# Altium schematic symbol library JST_Terminal.SchLib: 236 symbols (part 3 of 5)
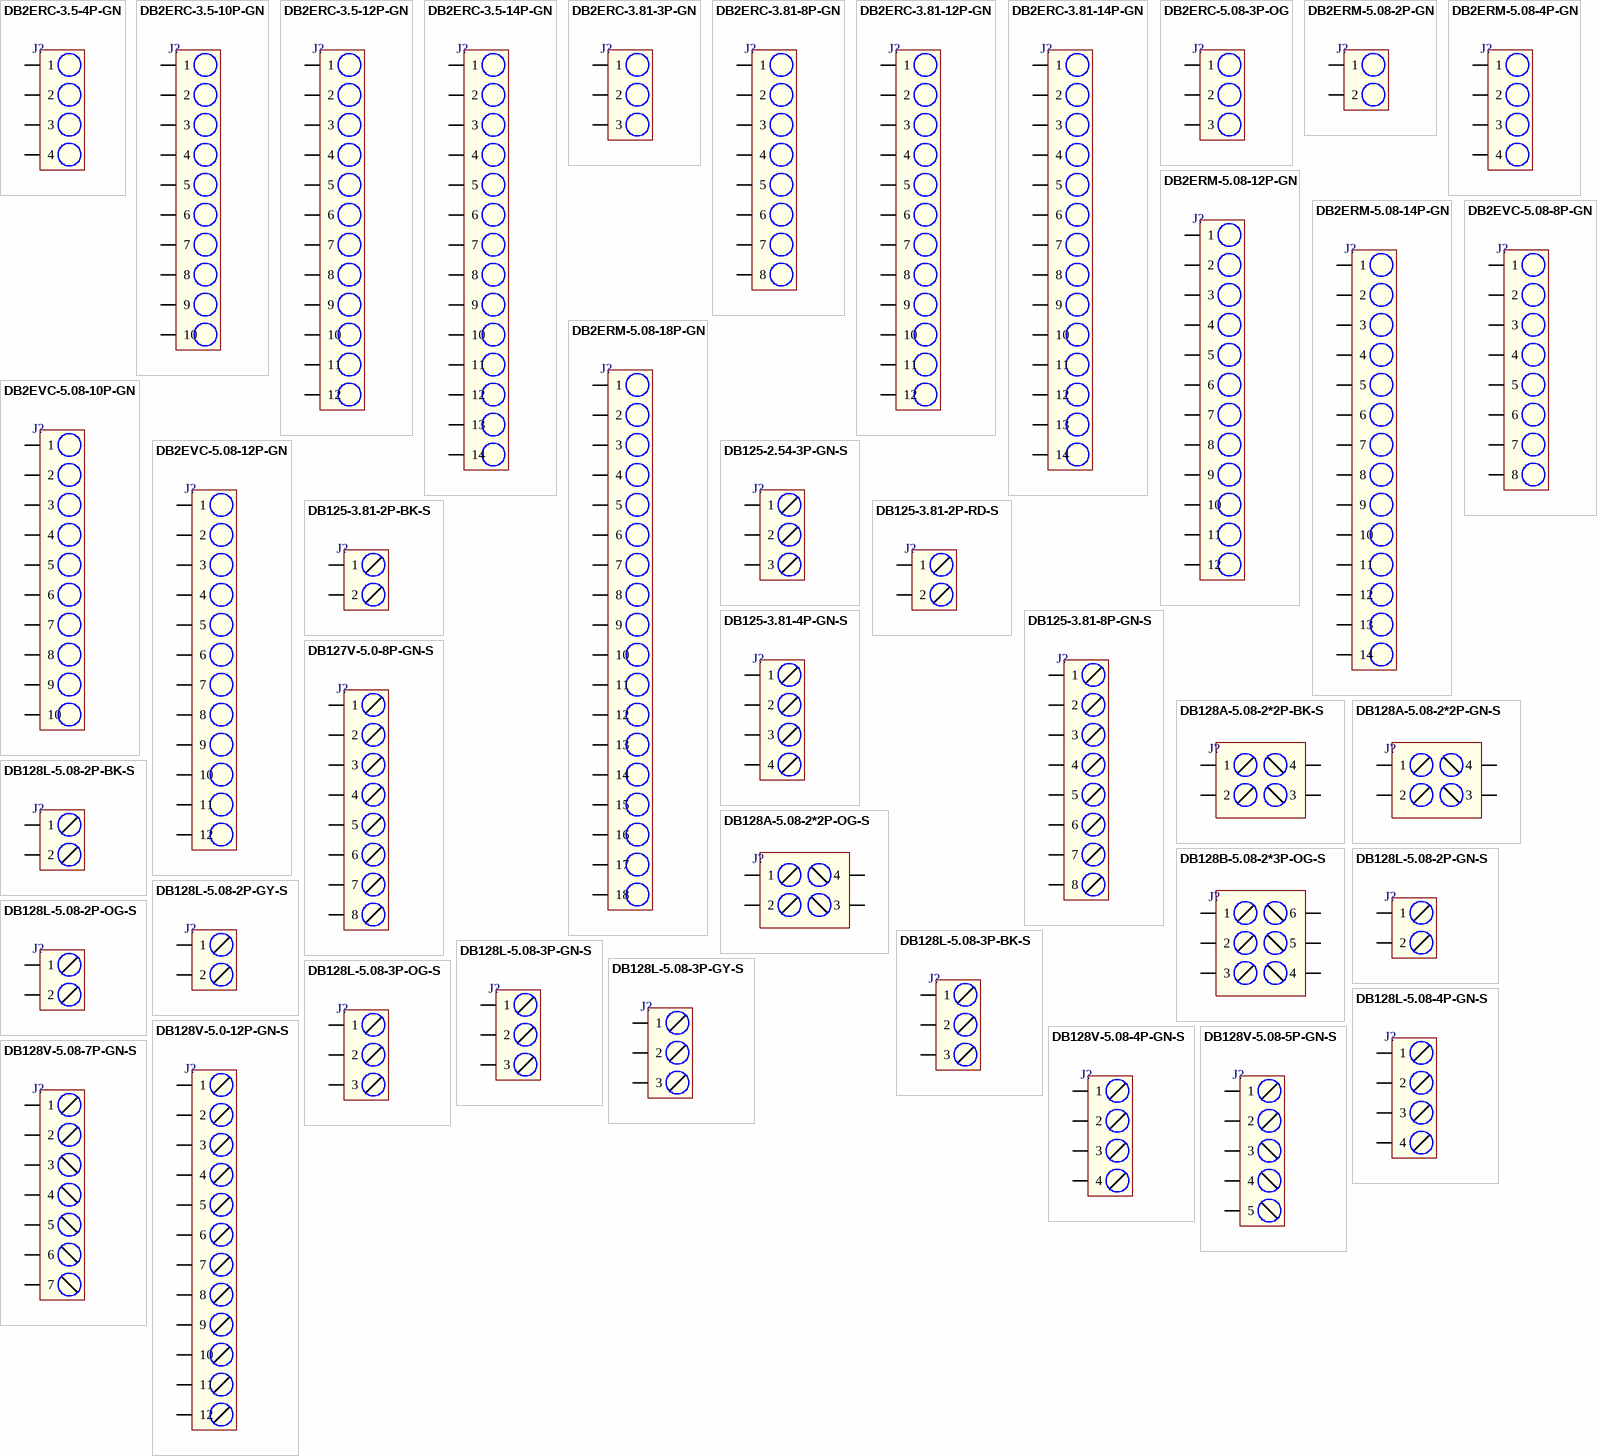
[diagram p7: symbols DB2ERC-3.5-4P-GN to DB128V-5.08-7P-GN-S]

## DB2ERM-5.08-18P-GN
designator J?
320V 20A 18 Bend -40℃~+105℃ 1 5.08mm 1x18P Green Receptacle-Close Screw Fixing Push-Pull,P=5.08mm Pluggable System Terminal Block ROHS; Manufacturer: DORABO; Manufacturer Part Number: DB2ERM-5.08-18P-GN; Package: Push-Pull,P=5.08mm; LCSC Part Number: C430542; Item Type: Terminal Block; ComponentLink1Description: LCSC; ComponentLink1URL: https://www.lcsc.com/product-detail/Pluggable-System-Terminal-Block_DORABO-DB2ERM-5-08-18P-GN_C430542.html?s_z=n_DB2ERM-5.08-18P-GN
footprint DB2ERM-5.08-18P-GN
pins: 1, 2, 3, 4, 5, 6, 7, 8, 9, 10, 11, 12, 13, 14, 15, 16, 17, 18

## DB2EVC-5.08-8P-GN
designator J?
320V 20A 8 Straight pin -40℃~+105℃ 1 5.08mm 1x8P Green Board Edge/Receptacle-Close Plugin,P=5.08mm Pluggable System Terminal Block ROHS; Manufacturer: DIBO; Manufacturer Part Number: DB2EVC-5.08-8P-GN; Package: Plugin,P=5.08mm; LCSC Part Number: C395784; Item Type: Terminal Block; ComponentLink1Description: LCSC; ComponentLink1URL: https://www.lcsc.com/product-detail/Pluggable-System-Terminal-Block_DIBO-DB2EVC-5-08-8P-GN_C395784.html
footprint DB2EVC-5.08-8P-GN
pins: 1, 2, 3, 4, 5, 6, 7, 8

## DB2EVC-5.08-10P-GN
designator J?
320V 20A 10 Straight pin -40℃~+105℃ 1 5.08mm 1x10P Green Board Edge/Receptacle-Close Plugin,P=5.08mm Pluggable System Terminal Block ROHS; Manufacturer: DIBO; Manufacturer Part Number: DB2EVC-5.08-10P-GN; Package: Plugin,P=5.08mm; LCSC Part Number: C395806; Item Type: Terminal Block; ComponentLink1Description: LCSC; ComponentLink1URL: https://www.lcsc.com/product-detail/Pluggable-System-Terminal-Block_DIBO-DB2EVC-5-08-10P-GN_C395806.html
footprint DB2EVC-5.08-10P-GN
pins: 1, 2, 3, 4, 5, 6, 7, 8, 9, 10

## DB2EVC-5.08-12P-GN
designator J?
320V 20A 12 Straight pin -40℃~+105℃ 1 5.08mm 1x12P Green Board Edge/Receptacle-Close Plugin,P=5.08mm Pluggable System Terminal Block ROHS; Manufacturer: DIBO; Manufacturer Part Number: DB2EVC-5.08-12P-GN; Package: Plugin,P=5.08mm; LCSC Part Number: C395823; Item Type: Terminal Block; ComponentLink1Description: LCSC; ComponentLink1URL: https://www.lcsc.com/product-detail/Pluggable-System-Terminal-Block_DIBO-DB2EVC-5-08-12P-GN_C395823.html
footprint DB2EVC-5.08-12P-GN
pins: 1, 2, 3, 4, 5, 6, 7, 8, 9, 10, 11, 12

## DB125-2.54-3P-GN-S
designator J?
1x3P -40℃~+105℃ 8A 130V 18~26 Direct Insert 2.54mm 0.5~1 1 3 Plugin,P=2.54mm Screw Terminal Blocks ROHS; Manufacturer: DORABO; Manufacturer Part Number: DB125-2.54-3P-GN-S; Package: Plugin,P=2.54mm; LCSC Part Number: C918121; Item Type: Terminal; ComponentLink1Description: LCSC; ComponentLink1URL: https://www.lcsc.com/product-detail/Screw-Terminal-Blocks_DORABO-DB125-2-54-3P-GN-S_C918121.html
footprint DB125-2.54-3P-GN-S
pins: 1, 2, 3

## DB125-3.81-2P-BK-S
designator J?
1x2P 10A -40℃~+105℃ 300V Black 16~26 Straight 3.81mm 0.5~1 1 2 Plugin,P=3.81mm Screw terminal ROHS; Manufacturer: DORABO; Manufacturer Part Number: DB125-3.81-2P-BK-S; Item Type: Terminal Block; Package: Plugin,P=3.81mm; LCSC Part Number: C430618; ComponentLink1Description: LCSC; ComponentLink1URL: https://www.lcsc.com/product-detail/Screw-terminal_DORABO-DB125-3-81-2P-BK-S_C430618.html
footprint DB125-3.81-2P-BK-S
pins: 1, 2

## DB125-3.81-2P-RD-S
designator J?
1x2P 10A -40℃~+105℃ 300V Red 16~26 Straight 3.81mm 0.5~1 1 2 Plugin,P=3.81mm Screw terminal ROHS; Manufacturer: DORABO; Manufacturer Part Number: DB125-3.81-2P-RD-S; Item Type: Terminal Block; Package: Plugin,P=3.81mm; LCSC Part Number: C881703; ComponentLink1Description: LCSC; ComponentLink1URL: https://www.lcsc.com/product-detail/Screw-terminal_DORABO-DB125-3-81-2P-RD-S_C881703.html
footprint DB125-3.81-2P-RD-S
pins: 1, 2

## DB125-3.81-4P-GN-S
designator J?
1x4P 10A -40℃~+105℃ 300V Green 16~26 Straight 3.81mm 0.5~1 1 4 Plugin,P=3.81mm Screw terminal ROHS; Manufacturer: DORABO; Manufacturer Part Number: DB125-3.81-4P-GN-S; Item Type: Terminal Block; Package: Plugin,P=3.81mm; LCSC Part Number: C395880; ComponentLink1Description: LCSC; ComponentLink1URL: https://www.lcsc.com/product-detail/Screw-terminal_DORABO-DB125-3-81-4P-GN-S_C395880.html
footprint DB125-3.81-4P-GN-S
pins: 1, 2, 3, 4

## DB125-3.81-8P-GN-S
designator J?
Plugin,P=3.81mm Screw Terminal Blocks ROHS; Manufacturer: DORABO; Manufacturer Part Number: DB125-3.81-8P-GN-S; Package: Plugin,P=3.81mm; LCSC Part Number: C5143698; Item Type: Terminal Block; ComponentLink1Description: LCSC; ComponentLink1URL: https://www.lcsc.com/product-detail/Screw-Terminal-Blocks_DORABO-DB125-3-81-8P-GN-S_C5143698.html
footprint DB125-3.81-8P-GN-S
pins: 1, 2, 3, 4, 5, 6, 7, 8

## DB127V-5.0-8P-GN-S
designator J?
1x8P -40℃~+105℃ 15A 250V Green 14~26 Straight 5mm 1.5 1 8 Plugin,P=5mm Screw Terminal Blocks ROHS; Manufacturer: DIBO; Manufacturer Part Number: DB127V-5.0-8P-GN-S; Supplier: LCSC; LCSC Part Number: C430626; RoHS: No; Item Type: Terminal Block
footprint DB127V-5.0-8P-GN-S
pins: 1, 2, 3, 4, 5, 6, 7, 8

## DB128A-5.08-2*2P-BK-S
designator J?
2x2P 20A -40℃~+105℃ 300V Black 12~28 Straight 5.08mm 1~2.5 2 2 Plugin,P=5.08mm Screw terminal ROHS; Manufacturer: DORABO; Manufacturer Part Number: DB128A-5.08-2*2P-BK-S; Item Type: Terminal Block; Package: Plugin,P=5.08mm; LCSC Part Number: C500035; ComponentLink1Description: LCSC; ComponentLink1URL: https://www.lcsc.com/product-detail/Screw-terminal_DORABO-DB128A-5-08-2-2P-BK-S_C500035.html
footprint DB128A-5.08-2*2P-BK-S
pins: 1, 2, 3, 4

## DB128A-5.08-2*2P-GN-S
designator J?
2x2P 20A -40℃~+105℃ 300V Green 12~28 Straight 5.08mm 1~2.5 2 2 Plugin,P=5.08mm Screw terminal ROHS; Manufacturer: DORABO; Manufacturer Part Number: DB128A-5.08-2*2P-GN-S; Item Type: Terminal Block; Package: Plugin,P=5.08mm; LCSC Part Number: C500029; ComponentLink1Description: LCSC; ComponentLink1URL: https://www.lcsc.com/product-detail/Screw-terminal_DORABO-DB128A-5-08-2-2P-GN-S_C500029.html
footprint DB128A-5.08-2*2P-GN-S
pins: 1, 2, 3, 4

## DB128A-5.08-2*2P-OG-S
designator J?
Plugin,P=5.08mm Screw terminal ROHS; Manufacturer: DORABO; Manufacturer Part Number: DB128A-5.08-2*2P-OG-S; Item Type: Terminal Block; Package: Plugin,P=5.08mm; LCSC Part Number: C5182976; ComponentLink1Description: LCSC; ComponentLink1URL: https://www.lcsc.com/product-detail/Screw-terminal_DORABO-DB128A-5-08-2-2P-OG-S_C5182976.html
footprint DB128A-5.08-2*2P-OG-S
pins: 1, 2, 3, 4

## DB128B-5.08-2*3P-OG-S
designator J?
2x3P 20A -40℃~+105℃ 300V Orange 12~28 Straight 5.08mm 1~2.5 2 3 Plugin,P=5.08mm Screw terminal ROHS; Manufacturer: DORABO; Manufacturer Part Number: DB128B-5.08-2*3P-OG-S; Item Type: Terminal Block; Package: Plugin,P=5.08mm; LCSC Part Number: C500034; ComponentLink1Description: LCSC; ComponentLink1URL: https://www.lcsc.com/product-detail/Screw-terminal_DORABO-DB128B-5-08-2-3P-OG-S_C500034.html
footprint DB128B-5.08-2*3P-OG-S
pins: 1, 2, 3, 4, 5, 6

## DB128L-5.08-2P-BK-S
designator J?
1x2P 18A -40℃~+105℃ 250V Black 12~30 Straight pin 5.08mm 2.5 1 2 Plugin,P=5.08mm Screw terminal ROHS; Manufacturer: DIBO; Manufacturer Part Number: DB128L-5.08-2P-BK-S; Item Type: Terminal Block; Package: Plugin,P=5.08mm; LCSC Part Number: C430601; ComponentLink1Description: LCSC; ComponentLink1URL: https://www.lcsc.com/product-detail/Screw-terminal_span-style-background-color-ff0-DIBO-span-DB128L-5-08-2P-BK-S_C430601.html
footprint DB128L-5.08-2P-BK-S
pins: 1, 2

## DB128L-5.08-2P-GN-S
designator J?
1x2P 18A -40℃~+105℃ 250V Green 12~30 Straight 5.08mm 2.5 1 2 Plugin,P=5.08mm Screw terminal ROHS; Manufacturer: DORABO; Manufacturer Part Number: DB128L-5.08-2P-GN-S; Item Type: Terminal Block; Package: Plugin,P=5.08mm; LCSC Part Number: C395868; ComponentLink1Description: LCSC; ComponentLink1URL: https://www.lcsc.com/product-detail/Screw-terminal_DORABO-DB128L-5-08-2P-GN-S_C395868.html
footprint DB128L-5.08-2P-GN-S
pins: 1, 2

## DB128L-5.08-2P-GY-S
designator J?
1x2P 20A -40℃~+105℃ 300V Gray 12~30 Straight 5.08mm 1~2.5 1 2 Plugin,P=5.08mm Screw terminal ROHS; Manufacturer: DORABO; Manufacturer Part Number: DB128L-5.08-2P-GY-S; Item Type: Terminal Block; Package: Plugin,P=5.08mm; LCSC Part Number: C500021; ComponentLink1Description: LCSC; ComponentLink1URL: https://www.lcsc.com/product-detail/Screw-terminal_DORABO-DB128L-5-08-2P-GY-S_C500021.html
footprint DB128L-5.08-2P-GY-S
pins: 1, 2

## DB128L-5.08-2P-OG-S
designator J?
1x2P 18A -40℃~+105℃ 250V Orange 12~30 Straight 5.08mm 2.5 1 2 Plugin,P=5.08mm Screw terminal ROHS; Manufacturer: DORABO; Manufacturer Part Number: DB128L-5.08-2P-OG-S; Item Type: Terminal Block; Package: Plugin,P=5.08mm; LCSC Part Number: C430603; ComponentLink1Description: LCSC; ComponentLink1URL: https://www.lcsc.com/product-detail/Screw-terminal_DORABO-DB128L-5-08-2P-OG-S_C430603.html
footprint DB128L-5.08-2P-OG-S
pins: 1, 2

## DB128L-5.08-3P-BK-S
designator J?
1x3P 18A -40℃~+105℃ 250V Black 12~30 Straight pin 5.08mm 2.5 1 3 Plugin,P=5.08mm Screw terminal ROHS; Manufacturer: DIBO; Manufacturer Part Number: DB128L-5.08-3P-BK-S; Item Type: Terminal Block; Package: Plugin,P=5.08mm; LCSC Part Number: C430602; ComponentLink1Description: LCSC; ComponentLink1URL: https://www.lcsc.com/product-detail/Screw-terminal_DIBO-DB128L-5-08-3P-BK-S_C430602.html
footprint DB128L-5.08-3P-BK-S
pins: 1, 2, 3

## DB128L-5.08-3P-GN-S
designator J?
1x3P 18A -40℃~+105℃ 250V Green 12~30 Direct Insert 5.08mm 2.5 1 3 Plugin,P=5.08mm Screw Terminal Blocks ROHS; Manufacturer: DORABO; Manufacturer Part Number: DB128L-5.08-3P-GN-S; Package: Plugin,P=5.08mm; LCSC Part Number: C395869; Item Type: Terminal Block; ComponentLink1Description: LCSC; ComponentLink1URL: https://www.lcsc.com/product-detail/Screw-Terminal-Blocks_DORABO-DB128L-5-08-3P-GN-S_C395869.html
footprint DB128L-5.08-3P-GN-S
pins: 1, 2, 3

## DB128L-5.08-3P-GY-S
designator J?
1x3P 20A -40℃~+105℃ 300V Gray 12~30 Direct Insert 5.08mm 1~2.5 1 3 Plugin,P=5.08mm Screw Terminal Blocks ROHS; Manufacturer: DORABO; Manufacturer Part Number: DB128L-5.08-3P-GY-S; Package: Plugin,P=5.08mm; LCSC Part Number: C500022; Item Type: Terminal Block; ComponentLink1Description: LCSC; ComponentLink1URL: https://www.lcsc.com/product-detail/Screw-Terminal-Blocks_DORABO-DB128L-5-08-3P-GY-S_C500022.html
footprint DB128L-5.08-3P-GY-S
pins: 1, 2, 3

## DB128L-5.08-3P-OG-S
designator J?
1x3P 18A -40℃~+105℃ 250V Orange 12~30 Direct Insert 5.08mm 2.5 1 3 Plugin,P=5.08mm Screw Terminal Blocks ROHS; Manufacturer: DORABO; Manufacturer Part Number: DB128L-5.08-3P-OG-S; Package: Plugin,P=5.08mm; LCSC Part Number: C430604; Item Type: Terminal Block; ComponentLink1Description: LCSC; ComponentLink1URL: https://www.lcsc.com/product-detail/Screw-Terminal-Blocks_DORABO-DB128L-5-08-3P-OG-S_C430604.html
footprint DB128L-5.08-3P-OG-S
pins: 1, 2, 3

## DB128L-5.08-4P-GN-S
designator J?
1x4P 18A -40℃~+105℃ 250V Green 12~30 Direct Insert 5.08mm 2.5 1 4 Plugin,P=5.08mm Screw Terminal Blocks ROHS; Manufacturer: DORABO; Manufacturer Part Number: DB128L-5.08-4P-GN-S; Package: Plugin,P=5.08mm; LCSC Part Number: C2827883; Item Type: Terminal Block; ComponentLink1Description: LCSC; ComponentLink1URL: https://www.lcsc.com/product-detail/Screw-Terminal-Blocks_DORABO-DB128L-5-08-4P-GN-S_C2827883.html
footprint DB128L-5.08-4P-GN-S
pins: 1, 2, 3, 4

## DB128V-5.0-12P-GN-S
designator J?
1x12P 20A -40℃~+105℃ 300V Green 12~30 Direct Insert 5mm 2.5 1 12 Plugin,P=5mm Screw Terminal Blocks ROHS; Manufacturer: DORABO; Manufacturer Part Number: DB128V-5.0-12P-GN-S; Package: Plugin,P=5mm; LCSC Part Number: C424688; Item Type: Terminal Block; ComponentLink1Description: LCSC; ComponentLink1URL: https://www.lcsc.com/product-detail/Screw-Terminal-Blocks_DORABO-DB128V-5-0-12P-GN-S_C424688.html
footprint DB128V-5.0-12P-GN-S
pins: 1, 2, 3, 4, 5, 6, 7, 8, 9, 10, 11, 12

## DB128V-5.08-4P-GN-S
designator J?
1x4P 20A -40℃~+105℃ 300V Green 12~30 Straight 5.08mm 2.5 1 4 Plugin,P=5.08mm Screw terminal ROHS; Manufacturer: DORABO; Manufacturer Part Number: DB128V-5.08-4P-GN-S; Package: Plugin,P=5.08mm; LCSC Part Number: C2915641; Item Type: Screw terminal; ComponentLink1Description: LCSC; ComponentLink1URL: https://www.lcsc.com/product-detail/Screw-terminal_DORABO-DB128V-5-08-4P-GN-S_C2915641.html
footprint DB128V-5.08-4P-GN-S
pins: 1, 2, 3, 4

## DB128V-5.08-5P-GN-S
designator J?
1x5P 20A -40℃~+105℃ 300V Green 12~30 Direct Insert 5.08mm 2.5 1 5 Plugin,P=5.08mm Screw Terminal Blocks ROHS; Manufacturer: DORABO; Manufacturer Part Number: DB128V-5.08-5P-GN-S; Package: Plugin,P=5.08mm; LCSC Part Number: C2927513; ComponentLink1Description: LCSC; ComponentLink1URL: https://www.lcsc.com/product-detail/Screw-Terminal-Blocks_DORABO-DB128V-5-08-5P-GN-S_C2927513.html; Item Type: Terminal Block
footprint DB128V-5.08-5P-GN-S
pins: 1, 2, 3, 4, 5

## DB128V-5.08-7P-GN-S
designator J?
1x7P 20A -40℃~+105℃ 300V Green 12~30 Direct Insert 5.08mm 2.5 1 7 Plugin,P=5.08mm Screw Terminal Blocks ROHS; Manufacturer: DORABO; Manufacturer Part Number: DB128V-5.08-7P-GN-S; Package: Plugin,P=5.08mm; LCSC Part Number: C2927514; ComponentLink1Description: LCSC; ComponentLink1URL: https://www.lcsc.com/product-detail/Screw-Terminal-Blocks_DORABO-DB128V-5-08-7P-GN-S_C2927514.html; Item Type: Terminal Block
footprint DB128V-5.08-7P-GN-S
pins: 1, 2, 3, 4, 5, 6, 7

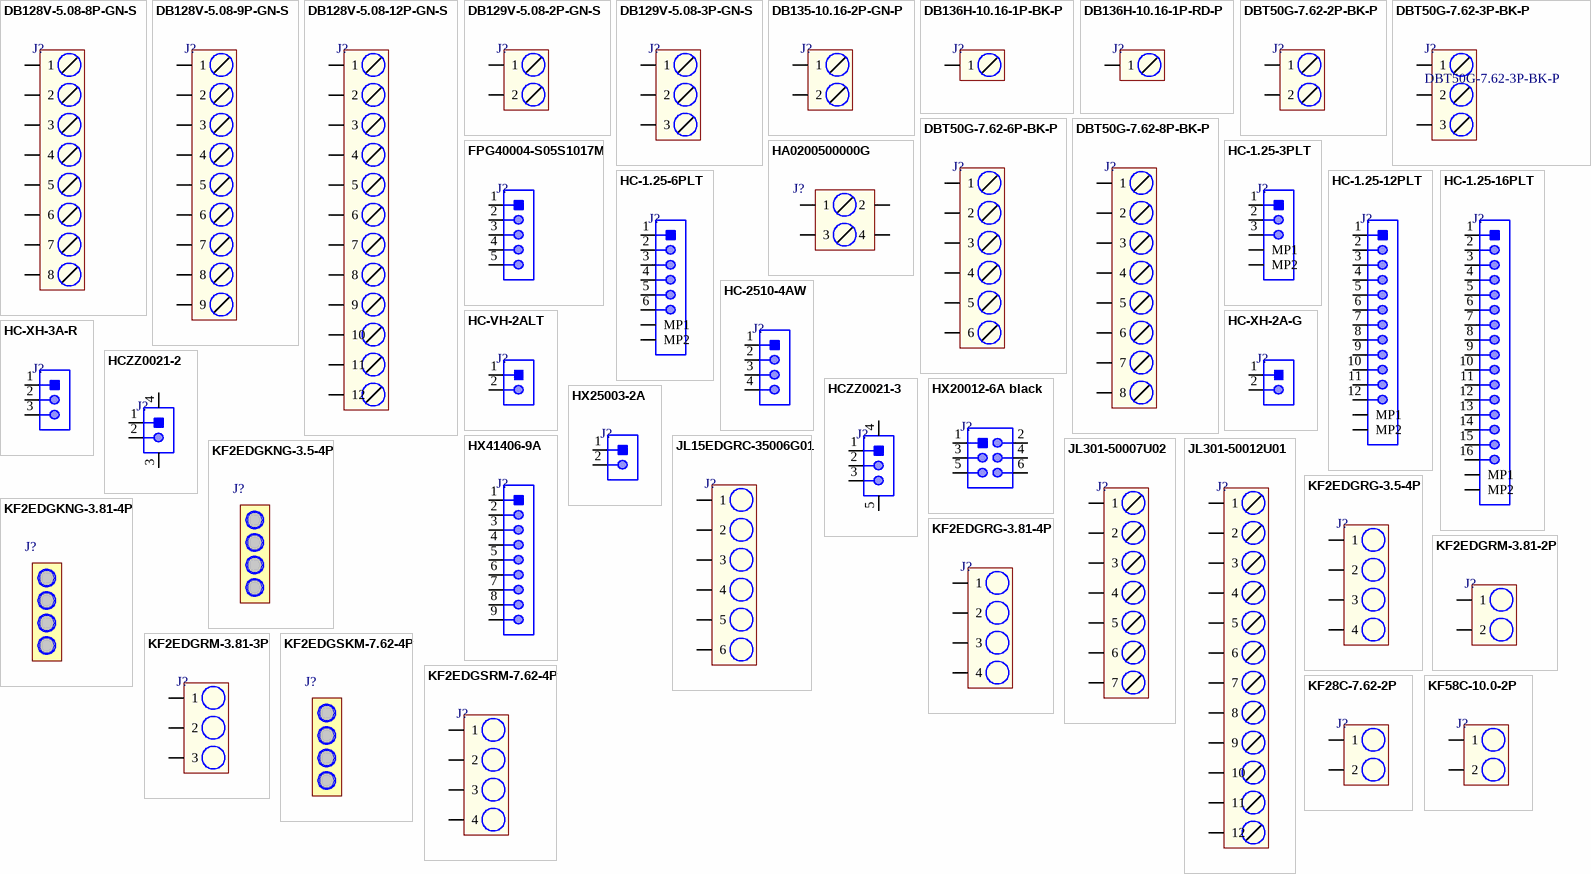
[diagram p3: symbols DB128V-5.08-8P-GN-S to KF58C-10.0-2P]

## DB128V-5.08-8P-GN-S
designator J?
10A 1x8P -40℃~+105℃ 300V Green 12~22 Direct Insert 5.08mm 1 8 Plugin,P=5.08mm Screw Terminal Blocks ROHS; Manufacturer: DORABO; Manufacturer Part Number: DB128V-5.08-8P-GN-S; Package: Plugin,P=5.08mm; LCSC Part Number: C5143711; Item Type: Terminal Block; ComponentLink1Description: LCSC; ComponentLink1URL: https://www.lcsc.com/product-detail/Screw-Terminal-Blocks_DORABO-DB128V-5-08-8P-GN-S_C5143711.html
footprint DB128V-5.08-8P-GN-S
pins: 1, 2, 3, 4, 5, 6, 7, 8

## DB128V-5.08-9P-GN-S
designator J?
1x9P 20A -40℃~+105℃ 300V Green 12~30 Straight pin 5.08mm 2.5 1 9 Plugin,P=5.08mm Screw terminal ROHS; Manufacturer: DIBO; Manufacturer Part Number: DB128V-5.08-9P-GN-S; Item Type: Terminal Block; Package: Plugin,P=5.08mm; LCSC Part Number: C2938972; ComponentLink1Description: LCSC; ComponentLink1URL: https://www.lcsc.com/product-detail/Screw-terminal_DIBO-DB128V-5-08-9P-GN-S_C2938972.html
footprint DB128V-5.08-9P-GN-S
pins: 1, 2, 3, 4, 5, 6, 7, 8, 9

## DB128V-5.08-12P-GN-S
designator J?
1x12P 20A -40℃~+105℃ 300V Green 12~30 Direct Insert 5.08mm 2.5 1 12 Plugin,P=5.08mm Screw Terminal Blocks ROHS; Manufacturer: DIBO; Manufacturer Part Number: DB128V-5.08-12P-GN-S; Package: Plugin,P=5.08mm; LCSC Part Number: C2927515; Item Type: Terminal Block; ComponentLink1Description: LCSC; ComponentLink1URL: https://www.lcsc.com/product-detail/Screw-Terminal-Blocks_DORABO-DB128V-5-08-12P-GN-S_C2927515.html
footprint DB128V-5.08-12P-GN-S
pins: 1, 2, 3, 4, 5, 6, 7, 8, 9, 10, 11, 12

## DB129V-5.08-2P-GN-S
designator J?
1x2P 24A -40℃~+105℃ 250V Green 12~26 Straight 5.08mm 2.5 1 2 Plugin,P=5.08mm Screw terminal ROHS; Manufacturer: DORABO; Manufacturer Part Number: DB129V-5.08-2P-GN-S; Item Type: Terminal Block; Package: Plugin,P=5.08mm; LCSC Part Number: C430594; ComponentLink1Description: LCSC; ComponentLink1URL: https://www.lcsc.com/product-detail/Screw-terminal_DORABO-DB129V-5-08-2P-GN-S_C430594.html
footprint DB129V-5.08-2P-GN-S
pins: 1, 2

## DB129V-5.08-3P-GN-S
designator J?
1x3P 24A -40℃~+105℃ 250V Green 12~26 Straight 5.08mm 2.5 1 3 Plugin,P=5.08mm Screw terminal ROHS; Manufacturer: DORABO; Manufacturer Part Number: DB129V-5.08-3P-GN-S; Item Type: Terminal Block; Package: Plugin,P=5.08mm; LCSC Part Number: C430595; ComponentLink1Description: LCSC; ComponentLink1URL: https://www.lcsc.com/product-detail/Screw-terminal_DORABO-DB129V-5-08-3P-GN-S_C430595.html
footprint DB129V-5.08-3P-GN-S
pins: 1, 2, 3

## DB135-10.16-2P-GN-P
designator J?
52A 1x2P -40℃~+105℃ 300V Green Through Hole 10.16mm 1 2 P=10.16mm Screw Terminal Blocks ROHS; Manufacturer: DORABO; Manufacturer Part Number: DB135-10.16-2P-GN-P; Package: P=10.16mm; LCSC Part Number: C2981775; Item Type: Terminal Block; ComponentLink1Description: LCSC; ComponentLink1URL: https://lcsc.com/product-detail/Screw-Terminal-Blocks_DORABO-DB135-10-16-2P-GN-P_C2981775.html
footprint DB135-10.16-2P-GN-P
pins: 1, 2

## DB136H-10.16-1P-BK-P
designator J?
1000V 57A 1 1 10.16mm P=10.16mm Pluggable System Terminal Block ROHS; Manufacturer: DORABO; Manufacturer Part Number: DB136H-10.16-1P-BK-P; Package: P=10.16mm; LCSC Part Number: C5445314; Item Type: Terminal Block; ComponentLink1Description: LCSC; ComponentLink1URL: https://www.lcsc.com/product-detail/Pluggable-System-Terminal-Block_DORABO-DB136H-10-16-1P-BK-P_C5445314.html
footprint DB136H-10.16-1P-BK-P
pins: 1

## DB136H-10.16-1P-RD-P
designator J?
1000V 57A 1 1 10.16mm P=10.16mm Pluggable System Terminal Block ROHS; Manufacturer: DORABO; Manufacturer Part Number: DB136H-10.16-1P-RD-P; Package: P=10.16mm; LCSC Part Number: C5445315; Item Type: Terminal Block; ComponentLink1Description: LCSC; ComponentLink1URL: https://www.lcsc.com/product-detail/Pluggable-System-Terminal-Block_DORABO-DB136H-10-16-1P-RD-P_C5445315.html
footprint DB136H-10.16-1P-RD-P
pins: 1

## DBT50G-7.62-2P-BK-P
designator J?
1x2P Corner With Cover Plate 2 1 7.62mm -40℃~+105℃ 20A 300V Black 12~22 Straight Needle Plugin,P=7.62mm Barrier Terminal Blocks ROHS; Manufacturer: DORABO; Manufacturer Part Number: DBT50G-7.62-2P-BK-P; Package: Plugin,P=7.62mm; LCSC Part Number: C496127; Item Type: Terminal Block; ComponentLink1Description: LCSC; ComponentLink1URL: https://www.lcsc.com/product-detail/Barrier-Terminal-Blocks_DORABO-DBT50G-7-62-2P-BK-P_C496127.html
footprint DBT50G-7.62-2P-BK-P
pins: 1, 2

## DBT50G-7.62-3P-BK-P
designator J?
1x3P Corner pin Barrier Block 3 1 7.62mm -40℃~+105℃ 20A 300V Black 12~22 Straight pin Plugin,P=7.62mm Barrier Terminal Blocks ROHS; Manufacturer: DIBO; Manufacturer Part Number: DBT50G-7.62-3P-BK-P; LCSC Part Number: C496128; ComponentLink1Description: LCSC; ComponentLink1URL: https://www.lcsc.com/product-detail/Barrier-Terminal-Blocks_DIBO-DBT50G-7-62-3P-BK-P_C496128.html
footprint DBT50G-7.62-3P-BK-P
pins: 1, 2, 3

## DBT50G-7.62-6P-BK-P
designator J?
1x6P Corner With Cover Plate 6 1 7.62mm -40℃~+105℃ 20A 300V Black 12~22 Straight Needle Plugin,P=7.62mm Barrier Terminal Blocks ROHS; Manufacturer: DORABO; Manufacturer Part Number: DBT50G-7.62-6P-BK-P; Package: Plugin,P=7.62mm; LCSC Part Number: C918110; Item Type: Terminal Block; ComponentLink1Description: LCSC; ComponentLink1URL: https://www.lcsc.com/product-detail/Barrier-Terminal-Blocks_DORABO-DBT50G-7-62-6P-BK-P_C918110.html
footprint DBT50G-7.62-6P-BK-P
pins: 1, 2, 3, 4, 5, 6

## DBT50G-7.62-8P-BK-P
designator J?
1x8P Corner With Cover Plate 8 1 7.62mm -40℃~+105℃ 20A 300V Black 12~22 Straight Needle Plugin,P=7.62mm Barrier Terminal Blocks ROHS; Manufacturer: DORABO; Manufacturer Part Number: DBT50G-7.62-8P-BK-P; Package: Plugin,P=7.62mm; LCSC Part Number: C918112; Item Type: Terminal Block; ComponentLink1Description: LCSC; ComponentLink1URL: https://www.lcsc.com/product-detail/Barrier-Terminal-Blocks_DORABO-DBT50G-7-62-8P-BK-P_C918112.html
footprint DBT50G-7.62-8P-BK-P
pins: 1, 2, 3, 4, 5, 6, 7, 8

## FPG40004-S05S1017M
designator J?
Blade/Shrapnel Connector -40℃~+105℃ Plugin Button And Strip Battery Connector ROHS; Manufacturer: TXGA; Manufacturer Part Number: FPG40004-S05S1017M; Package: Plugin; LCSC Part Number: C2834312; Item Type: Button And Strip Battery Connector; ComponentLink1Description: LCSC; ComponentLink1URL: https://www.lcsc.com/product-detail/Button-And-Strip-Battery-Connector_span-style-background-color-ff0-TXGA-span-FPG40004-S05S1017M_C2834312.html
footprint FPG40004-S05S1017M
pins: 1, 2, 3, 4, 5

## HA0200500000G
designator J?
TERM BLK 2POS TOP ENT 5.08MM PCB; Manufacturer: Amphenol; Manufacturer Part Number: HA0200500000G; Item Type: Terminal Block; Supplier 1: Arrow Electronics; RoHS: Yes; Stock 1: 120; Pricing 1: 2160=0.34600, 2520=0.34400, 3600=0.29460, 9000=0.29270, 18000=0.29070, 45000=0.28890, 90000=0.28680 (USD); Terminal and Terminal Block Type: BARRIER STRIP TERMINAL BLOCK; RoHS Compliant: Yes; Reach SVHC Compliant: Yes; ComponentLink1URL: https://datasheet.ciiva.com:443/pdfs/VipMasterIC/IC/AMPH/AMPH-S-A0005047712/AMPH-S-A0005047712-1.pdf?src-supplier=IHS+Markit; ComponentLink1Description: https://datasheet.ciiva.com:443/pdfs/VipMasterIC/IC/AMPH/AMPH-S-A0005047712/AMPH-S-A0005047712-1.pdf?src-supplier=IHS+Markit; Supplier Part Number 1: HA0200500000G; LCSC Part Number: C967080
footprint HA0200500000G
pins: 1, 2, 3, 4

## HC-1.25-3PLT
designator J?
1x3P 3P PicoBlade(MX 1.25) Tin 3 -25℃~+85℃ 2A 1 1.25mm Brass Standing paste SMD,P=1.25mm Wire To Board Connector ROHS; Manufacturer: HCTL; Manufacturer Part Number: HC-1.25-3PLT; Package: SMD,P=1.25mm; LCSC Part Number: C2845389; Item Type: Connector; ComponentLink1Description: LCSC; ComponentLink1URL: https://www.lcsc.com/product-detail/Wire-To-Board-Connector_HCTL-HC-1-25-3PLT_C2845389.html
footprint HC-1.25-3PLT
pins: 1, 2, 3, MP1, MP2

## HC-1.25-6PLT
designator J?
1x6P 6P PicoBlade(MX 1.25) Tin 6 -25℃~+85℃ 2A 1 1.25mm Brass Surface Mount,Vertical SMD,P=1.25mm Wire To Board Connector ROHS; Manufacturer: HCTL; Manufacturer Part Number: HC-1.25-6PLT; Package: SMD,P=1.25mm; LCSC Part Number: C2845392; Item Type: Connector; ComponentLink1Description: LCSC; ComponentLink1URL: https://lcsc.com/product-detail/Wire-To-Board-Connector_HCTL-HC-1-25-6PLT_C2845392.html?s_z=n_HC-1.25-6PLT
footprint HC-1.25-6PLT
pins: 1, 2, 3, 4, 5, 6, MP1, MP2

## HC-1.25-12PLT
designator J?
1x12P 12P PicoBlade(MX 1.25) Tin 12 -25℃~+85℃ 2A 1 1.25mm Brass Surface Mount,Vertical SMD,P=1.25mm Wire To Board Connector ROHS; Manufacturer: HCTL; Manufacturer Part Number: HC-1.25-12PLT; Package: SMD,P=1.25mm; LCSC Part Number: C2937190; Item Type: Wire To Board Connector; ComponentLink1Description: LCSC; ComponentLink1URL: https://lcsc.com/product-detail/Wire-To-Board-Connector_HCTL-HC-1-25-12PLT_C2937190.html?s_z=n_1.25-12plt
footprint HC-1.25-12PLT
pins: 1, 2, 3, 4, 5, 6, 7, 8, 9, 10, 11, 12, MP1, MP2

## HC-1.25-16PLT
designator J?
1x16P PicoBlade(MX 1.25) 16P Tin 16 -25℃~+85℃ 2A 1 1.25mm Brass Surface Mount,Vertical SMD,P=1.25mm Wire To Board Connector ROHS; Manufacturer: HCTL; Manufacturer Part Number: HC-1.25-16PLT; Package: SMD,P=1.25mm; LCSC Part Number: C3012301; Item Type: Wire To Board Connector; ComponentLink1Description: LCSC; ComponentLink1URL: https://lcsc.com/product-detail/Wire-To-Board-Connector_HCTL-HC-1-25-16PLT_C3012301.html?s_z=n_HC-1.25-16PLT
footprint HC-1.25-16PLT
pins: 1, 2, 3, 4, 5, 6, 7, 8, 9, 10, 11, 12, 13, 14, 15, 16, MP1, MP2

## HC-2510-4AW
designator J?
1x4P 4P 1 Tin 2.54mm 4 -25℃~+85℃ Brass 4A Right-Angle Push-Pull,P=2.54mm Wire To Board Connector ROHS; Manufacturer: HCTL; Manufacturer Part Number: HC-2510-4AW; Package: Push-Pull,P=2.54mm; LCSC Part Number: C2982043; Item Type: Wire To Board Connector; ComponentLink1Description: LCSC; ComponentLink1URL: https://www.lcsc.com/product-detail/Wire-To-Board-Connector_HCTL-HC-2510-4AW_C2982043.html
footprint HC-2510-4AW
pins: 1, 2, 3, 4

## HC-VH-2ALT
designator J?
1x2P VH 1 3.96mm Male pin 2 -25℃~+85℃ 7A Brick nogging SMD,P=3.96mm Wire To Board / Wire To Wire Connector ROHS; Manufacturer: HCTL; Manufacturer Part Number: HC-VH-2ALT; Item Type: Wire To Board Connector; Package: SMD,P=3.96mm; LCSC Part Number: C2982080; ComponentLink1Description: LCSC; ComponentLink1URL: https://www.lcsc.com/product-detail/Wire-To-Board-Wire-To-Wire-Connector_HCTL-HC-VH-2ALT_C2982080.html
footprint HC-VH-2ALT
pins: 1, 2

## HC-XH-2A-G
designator J?
1x2P XH 1 2.54mm 2.54mm Male pin 2 -25℃~+85℃ 3A Straight Straight,P=2.5mm Wire To Board / Wire To Wire Connector ROHS; Manufacturer: HCTL; Manufacturer Part Number: HC-XH-2A-G; Item Type: JST Connector; Package: Straight,P=2.5mm; LCSC Part Number: C5341201; ComponentLink1Description: LCSC; ComponentLink1URL: https://www.lcsc.com/product-detail/Wire-To-Board-Wire-To-Wire-Connector_HCTL-HC-XH-2A-G_C5341201.html
footprint HC-XH-2A-G
pins: 1, 2

## HC-XH-3A-R
designator J?
1x3P 3P XH 1 Tin 2.5mm 3 -25℃~+85℃ Brass 3A Straight Plugin,P=2.5mm Wire To Board Connector ROHS; Manufacturer: HCTL; Manufacturer Part Number: HC-XH-3A-R; Package: Plugin,P=2.5mm; LCSC Part Number: C7466690; Item Type: Wire To Board Connector; ComponentLink1Description: LCSC; ComponentLink1URL: https://www.lcsc.com/product-detail/Wire-To-Board-Connector_HCTL-HC-XH-3A-R_C7466690.html
footprint HC-XH-3A-R
pins: 1, 2, 3

## HCZZ0021-2
designator J?
SMD,P=2.54mm,Surface Mount，Right Angle; Manufacturer: Hong Cheng; Manufacturer Part Number: HCZZ0021-2; Item Type: Right Angle Wire To Board Connector; Package: SMD,P=2.54mm,Surface Mount，Right Angle; LCSC Part Number: C7433707; ComponentLink1Description: LCSC; ComponentLink1URL: https://www.lcsc.com/product-detail/Wire-To-Board-Connector_Hong-Cheng-HCZZ0021-2_C7433707.html
footprint HCZZ0021-2
pins: 1, 2, 3, 4

## HCZZ0021-3
designator J?
SMD,P=2.54mm,Surface Mount，Right Angle; Manufacturer: Hong Cheng; Manufacturer Part Number: HCZZ0021-3; Item Type: Right Angle Wire To Board Connector; Package: SMD,P=2.54mm,Surface Mount，Right Angle; LCSC Part Number: C7433708; ComponentLink1Description: LCSC; ComponentLink1URL: https://www.lcsc.com/product-detail/Wire-To-Board-Connector_Hong-Cheng-HCZZ0021-3_C7433708.html
footprint HCZZ0021-3
pins: 1, 2, 3, 4, 5

## HX20012-6A black
designator J?
2x3P 2 2mm 2mm male 3 -25℃~+85℃ 3A Straight Plugin,P=2mm Wire To Board / Wire To Wire Connector ROHS; Manufacturer: HX(Zhejiang Yueqing Hongxing Elec); Manufacturer Part Number: HX20012-6A black; Package: Plugin,P=2mm; LCSC Part Number: C469723; Item Type: Wire To Wire Connector; ComponentLink1Description: LCSC; ComponentLink1URL: https://jlcpcb.com/partdetail/475972-HX20012_6Ablack/C469723
footprint HX20012-6A black
pins: 1, 2, 3, 4, 5, 6

## HX25003-2A
designator J?
1x2P 2P XH 1 2.5mm 2 Straight Plugin,P=2.5mm Wire To Board Connector ROHS; Manufacturer: HX; Manufacturer Part Number: HX25003-2A; Package: Plugin,P=2.5mm; LCSC Part Number: C442299; Item Type: Wire To Board Connector; ComponentLink1Description: LCSC; ComponentLink1URL: https://www.lcsc.com/product-detail/Wire-To-Board-Connector_HX-Zhejiang-Yueqing-Hongxing-Elec-HX25003-2A_C442299.html
footprint HX25003-2A
pins: 1, 2

## HX41406-9A
designator J?
3x3P 9P 3 4.14mm 4.14mm 3 -25℃~+105℃ 8A Straight Plugin,P=4.14mm Wire To Board Connector ROHS; Manufacturer: HX(Zhejiang Yueqing Hongxing Elec); Manufacturer Part Number: HX41406-9A; Package: Plugin,P=4.14mm; LCSC Part Number: C704507; Item Type: Wire To Board Connector; ComponentLink1Description: LCSC; ComponentLink1URL: https://www.lcsc.com/product-detail/Wire-To-Board-Connector_HX-Zhejiang-Yueqing-Hongxing-Elec-HX41406-9A_C704507.html
footprint HX41406-9A
pins: 1, 2, 3, 4, 5, 6, 7, 8, 9

## JL15EDGRC-35006G01
designator J?
300V 8A 6 Bend -40℃~+105℃ 1 3.5mm 1x6P Green Receptacle-Close Push-Pull,P=3.5mm Pluggable System Terminal Block ROHS; Manufacturer: JILN; Manufacturer Part Number: JL15EDGRC-35006G01; Package: Push-Pull,P=3.5mm; LCSC Part Number: C409119; Item Type: Terminal Block; ComponentLink1Description: LCSC; ComponentLink1URL: https://www.lcsc.com/product-detail/Pluggable-System-Terminal-Block_JILN-JL15EDGRC-35006G01_C409119.html
footprint JL15EDGRC-35006G01
pins: 1, 2, 3, 4, 5, 6

## JL301-50007U02
designator J?
1x7P -40℃~+105℃ 15A 300V Blue 12~24 Direct Insert 5mm 1 7 Plugin,P=5mm Screw Terminal Blocks ROHS; Manufacturer: JILN; Manufacturer Part Number: JL301-50007U02; Package: Plugin,P=5mm; LCSC Part Number: C409139; Item Type: Screw Terminal; ComponentLink1Description: LCSC; ComponentLink1URL: https://www.lcsc.com/product-detail/Screw-Terminal-Blocks_JILN-JL301-50007U02_C409139.html
footprint JL301-50007U02
pins: 1, 2, 3, 4, 5, 6, 7

## JL301-50012U01
designator J?
1x12P -40℃~+105℃ 15A 300V Blue 12~24 Direct Insert 5mm 1 12 Plugin,P=5mm Screw Terminal Blocks ROHS; Manufacturer: JILN; Manufacturer Part Number: JL301-50012U01; Package: Plugin,P=5mm; LCSC Part Number: C1509686; Item Type: Screw Terminal; ComponentLink1Description: LCSC; ComponentLink1URL: https://www.lcsc.com/product-detail/Screw-Terminal-Blocks_JILN-JL301-50012U01_C1509686.html
footprint JL301-50012U01
pins: 1, 2, 3, 4, 5, 6, 7, 8, 9, 10, 11, 12

## KF2EDGKNG-3.5-4P
designator J?  (mechanical)
-40℃~+105℃ 1.5 1 16~28 3.5mm 300V 10A 4 1x4P Green Male Plug Snap Fit P=3.5mm Pluggable System Terminal Block ROHS; Manufacturer: Cixi Kefa Elec; Manufacturer Part Number: KF2EDGKNG-3.5-4P; Package: P=3.5mm; LCSC Part Number: C2923019; Item Type: Terminal Block; ComponentLink1Description: LCSC; ComponentLink1URL: https://www.lcsc.com/product-detail/Pluggable-System-Terminal-Block_Cixi-Kefa-Elec-KF2EDGKNG-3-5-4P_C2923019.html

## KF2EDGKNG-3.81-4P
designator J?  (mechanical)
-40℃~+105℃ 1.5 1 16~28 3.81mm 160V 7A 4 1x4P Green Plug Snap Fit P=3.81mm Pluggable System Terminal Block ROHS; Manufacturer: Cixi Kefa Elec; Manufacturer Part Number: KF2EDGKNG-3.81-4P; Package: P=3.81mm; LCSC Part Number: C2923028; Item Type: Terminal Block; ComponentLink1Description: LCSC; ComponentLink1URL: https://www.lcsc.com/product-detail/Pluggable-System-Terminal-Block_Cixi-Kefa-Elec-KF2EDGKNG-3-81-4P_C2923028.html?s_z=n_KF2EDGKNG-3.81-4P

## KF2EDGRG-3.5-4P
designator J?
Bend -40℃~+105℃ 1 3.5mm 300V 10A 4 1x4P Green Receptacle-Close Snap Fit Plugin,P=3.5mm Pluggable System Terminal Block ROHS; Manufacturer: Cixi Kefa Elec; Manufacturer Part Number: KF2EDGRG-3.5-4P; Package: Plugin,P=3.5mm; LCSC Part Number: C6392914; Item Type: Terminal Block; ComponentLink1Description: LCSC; ComponentLink1URL: https://www.lcsc.com/product-detail/Pluggable-System-Terminal-Block_Cixi-Kefa-Elec-KF2EDGRG-3-5-4P_C6392914.html
footprint KF2EDGRG-3.5-4P
pins: 1, 2, 3, 4

## KF2EDGRG-3.81-4P
designator J?
Plugin,P=3.81mm Pluggable System Terminal Block ROHS; Manufacturer: Cixi Kefa Elec; Manufacturer Part Number: KF2EDGRG-3.81-4P; Package: Plugin,P=3.81mm; LCSC Part Number: C6392932; Item Type: Terminal Block; ComponentLink1Description: LCSC; ComponentLink1URL: https://www.lcsc.com/product-detail/Pluggable-System-Terminal-Block_Cixi-Kefa-Elec-KF2EDGRG-3-81-4P_C6392932.html?s_z=n_KF2EDGRG-3.81-4P
footprint KF2EDGRG-3.81-4P
pins: 1, 2, 3, 4

## KF2EDGRM-3.81-2P
designator J?
300V 8A 2 Bend -40℃~+105℃ 1 3.81mm 1x2P Green Board Edge/Receptacle-Close Screw fixed Push-Pull,P=3.81mm Pluggable System Terminal Block ROHS; Manufacturer: Cixi Kefa Elec; Manufacturer Part Number: KF2EDGRM-3.81-2P; Package: Push-Pull,P=3.81mm; LCSC Part Number: C441268; Item Type: Terminal Block; ComponentLink1Description: LCSC; ComponentLink1URL: https://www.lcsc.com/product-detail/Pluggable-System-Terminal-Block_Cixi-Kefa-Elec-KF2EDGRM-3-81-2P_C441268.html
footprint KF2EDGRM-3.81-2P
pins: 1, 2

## KF2EDGRM-3.81-3P
designator J?
300V 8A 3 Bend -40℃~+105℃ 1 3.81mm 1x3P Green Board Edge/Receptacle-Close Screw fixed Push-Pull,P=3.81mm Pluggable System Terminal Block ROHS; Manufacturer: Cixi Kefa Elec; Manufacturer Part Number: KF2EDGRM-3.81-3P; Package: Push-Pull,P=3.81mm; LCSC Part Number: C441269; Item Type: Terminal Block; ComponentLink1Description: LCSC; ComponentLink1URL: https://www.lcsc.com/product-detail/Pluggable-System-Terminal-Block_Cixi-Kefa-Elec-KF2EDGRM-3-81-3P_C441269.html
footprint KF2EDGRM-3.81-3P
pins: 1, 2, 3

## KF2EDGSKM-7.62-4P
designator J?  (mechanical)
-40℃~+105℃ 4 1 10~24 7.62mm 400V 32A 4 1x4P Green Plug Screw Fixing P=7.62mm Pluggable System Terminal Block ROHS; Manufacturer: Cixi Kefa Elec; Manufacturer Part Number: KF2EDGSKM-7.62-4P; Package: Push-Pull,P=7.62mm; LCSC Part Number: C577754; Item Type: Terminal Block; ComponentLink1Description: LCSC; ComponentLink1URL: https://www.lcsc.com/product-detail/Pluggable-System-Terminal-Block_Cixi-Kefa-Elec-KF2EDGSKM-7-62-4P_C577754.html?s_z=n_KF2EDGSKM-7.62-4P

## KF2EDGSRM-7.62-4P
designator J?
400V 32A 4 Bend -40℃~+105℃ 1 7.62mm 1x4P Green Receptacle-Close Screw Fixing Push-Pull,P=7.62mm Pluggable System Terminal Block ROHS; Manufacturer: Cixi Kefa Elec; Manufacturer Part Number: KF2EDGSRM-7.62-4P; Package: Push-Pull,P=7.62mm; LCSC Part Number: C577774; Item Type: Terminal Block; ComponentLink1Description: LCSC; ComponentLink1URL: https://www.lcsc.com/product-detail/Pluggable-System-Terminal-Block_Cixi-Kefa-Elec-KF2EDGSRM-7-62-4P_C577774.html?s_z=n_KF2EDGSRM-7.62-4P
footprint KF2EDGSRM-7.62-4P
pins: 1, 2, 3, 4

## KF28C-7.62-2P
designator J?
1x2P Midfoot Barrier Block 2 1 7.62mm 24A -40℃~+105℃ 250V Black 12~22 Straight pin 2.5 Plugin,P=7.62mm Barrier Terminal Blocks ROHS; Manufacturer: CiXi KaiFeng Electronics; Manufacturer Part Number: KF28C-7.62-2P; Supplier: LCSC; LCSC Part Number: C707609; RoHS: No; Item Type: Terminal Block; ComponentLink1Description: LCSC; ComponentLink1URL: https://www.lcsc.com/product-detail/Barrier-Terminal-Blocks_Cixi-Kefa-Elec-KF28C-7-62-2P_C707609.html
footprint KF28C-7.62-2P
pins: 1, 2

## KF58C-10.0-2P
designator J?
1x2P Midfoot Barrier Block 2 1 10mm -40℃~+105℃ 32A 750V Black 12~22 Straight pin 4 Plugin,P=10mm Barrier Terminal Blocks ROHS; Manufacturer: CiXi KaiFeng Electronics; Manufacturer Part Number: KF58C-10.0-2P; Supplier: LCSC; LCSC Part Number: C707693; RoHS: No; Item Type: Terminal Block; ComponentLink1Description: LCSC; ComponentLink1URL: https://www.lcsc.com/product-detail/Barrier-Terminal-Blocks_Cixi-Kefa-Elec-KF58C-10-0-2P_C707693.html
footprint KF58C-10.0-2P
pins: 1, 2

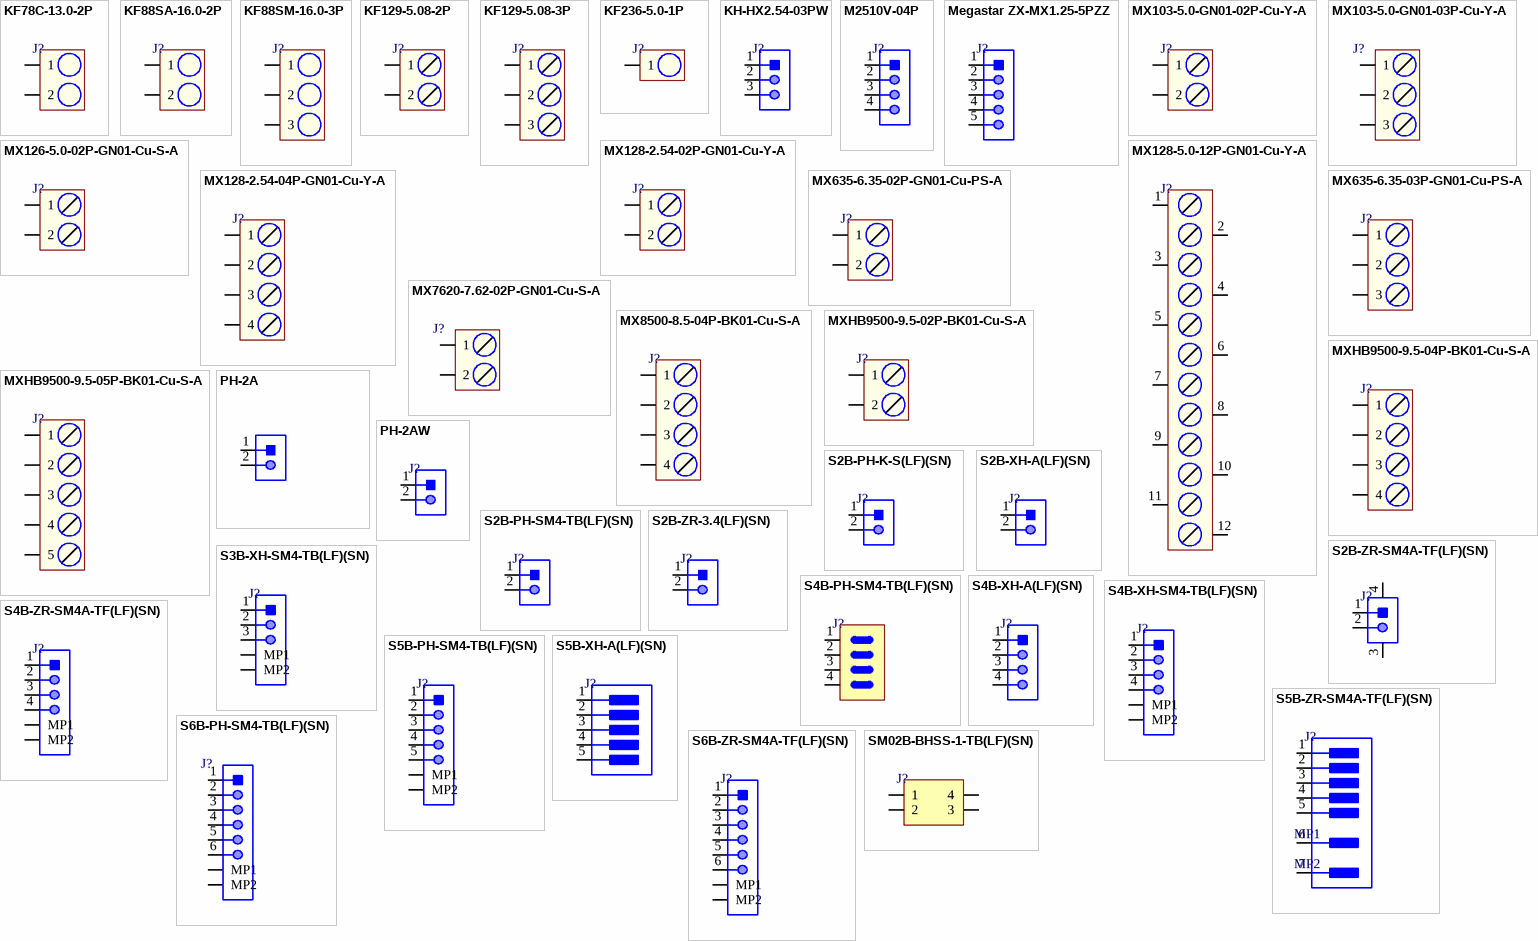
[diagram p4: symbols KF78C-13.0-2P to SM02B-BHSS-1-TB(LF)(SN)]

## KF78C-13.0-2P
designator J?
1x2P Midfoot Barrier Block 2 1 13mm 40A -40℃~+105℃ 750V Black 10~18 Straight pin 6 Plugin,P=13mm Barrier Terminal Blocks ROHS; Manufacturer: CiXi KaiFeng Electronics; Manufacturer Part Number: KF78C-13.0-2P; Supplier: LCSC; LCSC Part Number: C707721; RoHS: No; Item Type: Terminal Block
footprint KF78C-13.0-2P
pins: 1, 2

## KF88SA-16.0-2P
designator J?
1x2P Barrier Block 2 1 16mm -40℃~+105℃ 76A 1kV Black 6~14 Straight pin 16 Plugin,P=16mm Barrier Terminal Blocks ROHS; Manufacturer: CiXi KaiFeng Electronics; Manufacturer Part Number: KF88SA-16.0-2P; Supplier: LCSC; LCSC Part Number: C707749; RoHS: No; Item Type: Terminal Block; ComponentLink1Description: LCSC; ComponentLink1URL: https://www.lcsc.com/product-detail/Barrier-Terminal-Blocks_Cixi-Kefa-Elec-KF88SA-16-0-2P_C707749.html
footprint KF88SA-16.0-2P
pins: 1, 2

## KF88SM-16.0-3P
designator J?
1x3P With Cover Plate 3 1 16mm -40℃~+105℃ 76A 1kV Black 6~14 Straight Needle 16 Plugin,P=16mm Barrier Terminal Blocks ROHS; Manufacturer: Cixi Kefa Elec; Manufacturer Part Number: KF88SM-16.0-3P; Package: Plugin,P=16mm; LCSC Part Number: C707770; Item Type: Terminal Block; ComponentLink1Description: LCSC; ComponentLink1URL: https://www.lcsc.com/product-detail/Barrier-Terminal-Blocks_Cixi-Kefa-Elec-KF88SM-16-0-3P_C707770.html
footprint KF88SM-16.0-3P
pins: 1, 2, 3

## KF129-5.08-2P
designator J?
1x2P 24A -40℃~+105℃ 250V Green 12~24 Straight 5.08mm 2.5 1 2 Plugin,P=5.08mm Screw terminal ROHS; Manufacturer: CiXi KaiFeng Electronics; Manufacturer Part Number: KF129-5.08-2P; Supplier: LCSC; LCSC Part Number: C475092; RoHS: No; Item Type: Screw terminal
footprint KF129-5.08-2P
pins: 1, 2

## KF129-5.08-3P
designator J?
1x3P 24A -40℃~+105℃ 250V Green 12~24 Straight 5.08mm 2.5 1 3 Plugin,P=5.08mm Screw terminal ROHS; Manufacturer: CiXi KaiFeng Electronics; Manufacturer Part Number: KF129-5.08-3P; Supplier: LCSC; LCSC Part Number: C475093; RoHS: No; Item Type: Screw Terminal
footprint KF129-5.08-3P
pins: 1, 2, 3

## KF236-5.0-1P
designator J?
1.5 5mm 14~24 1x1P -40℃~+105℃ 10A 1P 300V Green 1 1 Plugin,P=5mm Spring Clamp System Terminal Block ROHS; Manufacturer: Cixi Kefa Elec; Manufacturer Part Number: KF236-5.0-1P; Package: Plugin,P=5mm; LCSC Part Number: C976595; Item Type: Terminal Block; ComponentLink1Description: LCSC; ComponentLink1URL: https://www.lcsc.com/product-detail/Spring-Clamp-System-Terminal-Block_Cixi-Kefa-Elec-KF236-5-0-1P_C976595.html
footprint KF236-5.0-1P
pins: 1

## KH-HX2.54-03PW
designator J?
1x3P 3P 1 2.54mm 3 Right-Angle Push-Pull,P=2.54mm Wire To Board Connector ROHS; Manufacturer: Shenzhen Kinghelm Elec; Manufacturer Part Number: KH-HX2.54-03PW; Package: Push-Pull,P=2.54mm; LCSC Part Number: C3250035; Item Type: Wire To Board Connector; ComponentLink1Description: LCSC; ComponentLink1URL: https://www.lcsc.com/product-detail/Wire-To-Board-Connector_Shenzhen-Kinghelm-Elec-KH-HX2-54-03PW_C3250035.html
footprint KH-HX2.54-03PW
pins: 1, 2, 3

## M2510V-04P
designator J?
1x4P 1 2.54mm Male pin 4 -25℃~+85℃ 3A Straight Plugin,P=2.54mm Wire To Board / Wire To Wire Connector ROHS; Manufacturer: XFCN; Manufacturer Part Number: M2510V-04P; Item Type: Wire To Board Connector; Package: Plugin,P=2.54mm; LCSC Part Number: C2764792; ComponentLink1Description: LCSC; ComponentLink1URL: https://www.lcsc.com/product-detail/Wire-To-Board-Wire-To-Wire-Connector_XFCN-M2510V-04P_C2764792.html
footprint M2510V-04P
pins: 1, 2, 3, 4

## Megastar ZX-MX1.25-5PZZ
designator J?
5P PicoBlade(MX 1.25) 1x5P Tin -25℃~+85℃ White 1.25mm 125V 5 1A 1 Through Hole Through Hole,P=1.25mm Headers, Male Pins RoHS; Manufacturer: Megastar; Manufacturer Part Number: Megastar ZX-MX1.25-5PZZ; Item Type: JST Connector; Package: Through Hole,P=1.25mm; LCSC Part Number: C7430461; ComponentLink1Description: LCSC; ComponentLink1URL: https://www.lcsc.com/product-detail/C7430461.html?s_z=n_ZX-MX1.25-5PZZ
footprint ZX-MX1.25-5PZZ
pins: 1, 2, 3, 4, 5

## MX103-5.0-GN01-02P-Cu-Y-A
designator J?
1x2P 10A -40℃~+105℃ 300V Green 12~24 Straight pin 5mm 2.5 1 2 Plugin,P=5mm Screw terminal ROHS; Manufacturer: MAX; Manufacturer Part Number: MX103-5.0-GN01-02P-Cu-Y-A; Package: Plugin,P=5mm; LCSC Part Number: C5188482; Item Type: Screw Terminal; ComponentLink1Description: LCSC; ComponentLink1URL: https://www.lcsc.com/product-detail/Screw-terminal_MAX-MX103-5-0-GN01-02P-Cu-Y-A_C5188482.html
footprint MX103-5.0-GN01-02P-Cu-Y-A
pins: 1, 2

## MX103-5.0-GN01-03P-Cu-Y-A
designator J?
1x3P 10A -40℃~+105℃ 300V Green 12~24 Straight pin 5mm 2.5 1 3 Plugin,P=5mm Screw terminal ROHS; Manufacturer: MAX; Manufacturer Part Number: MX103-5.0-GN01-03P-Cu-Y-A; Package: Plugin,P=5mm; LCSC Part Number: C5188483; ComponentLink1Description: LCSC; ComponentLink1URL: https://www.lcsc.com/product-detail/Screw-terminal_MAX-MX103-5-0-GN01-03P-Cu-Y-A_C5188483.html; Item Type: Screw Terminal
footprint MX103-5.0-GN01-03P-Cu-Y-A
pins: 1, 2, 3

## MX126-5.0-02P-GN01-Cu-S-A
designator J?
Copper Alloy 1x2P 10A -40℃~+105℃ 300V Green Tin 14~26 Straight pin 5mm 2.5 1 2 Plugin,P=5mm Screw terminal ROHS; Manufacturer: MAX; Manufacturer Part Number: MX126-5.0-02P-GN01-Cu-S-A; Package: Plugin,P=5mm; LCSC Part Number: C5188434; Item Type: Screw terminal; ComponentLink1Description: LCSC; ComponentLink1URL: https://jlcpcb.com/partdetail/Max-MX126_5_0_02P_GN01_Cu_SA/C5188434
footprint MX126-5.0-02P-GN01-Cu-S-A
pins: 1, 2

## MX128-2.54-02P-GN01-Cu-Y-A
designator J?
1x2P 6A -40℃~+105℃ 150V Green 18~24 Direct Insert 2.54mm 1 1 2 Plugin,P=2.54mm Screw Terminal Blocks ROHS; Manufacturer: MAX; Manufacturer Part Number: MX128-2.54-02P-GN01-Cu-Y-A; Package: Plugin,P=2.54mm; LCSC Part Number: C5188442; Item Type: Screw Terminal; ComponentLink1Description: LCSC; ComponentLink1URL: https://www.lcsc.com/product-detail/Screw-Terminal-Blocks_MAX-MX128-2-54-02P-GN01-Cu-Y-A_C5188442.html
footprint MX128-2.54-02P-GN01-Cu-Y-A
pins: 1, 2

## MX128-2.54-04P-GN01-Cu-Y-A
designator J?
1x4P 6A -40℃~+105℃ 150V Green 18~24 Direct Insert 2.54mm 1 1 4 Plugin,P=2.54mm Screw Terminal Blocks ROHS; Manufacturer: MAX; Manufacturer Part Number: MX128-2.54-04P-GN01-Cu-Y-A; Package: Plugin,P=2.54mm; LCSC Part Number: C5188444; Item Type: Screw Terminal; ComponentLink1Description: LCSC; ComponentLink1URL: https://www.lcsc.com/product-detail/Screw-Terminal-Blocks_MAX-MX128-2-54-04P-GN01-Cu-Y-A_C5188444.html
footprint MX128-2.54-04P-GN01-Cu-Y-A
pins: 1, 2, 3, 4

## MX128-5.0-12P-GN01-Cu-Y-A
designator J?
1x12P 10A -40℃~+105℃ 300V Green 12~24 Direct Insert 5mm 1 12 Plugin,P=5mm Screw Terminal Blocks ROHS; Manufacturer: MAX; Manufacturer Part Number: MX128-5.0-12P-GN01-Cu-Y-A; Package: Plugin,P=5mm; LCSC Part Number: C5290376; Item Type: Terminal Block; ComponentLink1Description: LCSC; ComponentLink1URL: https://www.lcsc.com/product-detail/Screw-Terminal-Blocks_MAX-MX128-5-0-12P-GN01-Cu-Y-A_C5290376.html
footprint MX128-5.0-12P-GN01-Cu-Y-A
pins: 1, 2, 3, 4, 5, 6, 7, 8, 9, 10, 11, 12

## MX635-6.35-02P-GN01-Cu-PS-A
designator J?
Copper Alloy 1x2P Tin 6.35mm 4 1 2 -40℃~+105℃ 30A 300V Green 10~26 Straight Plugin,P=6.35mm Screw terminal ROHS; Manufacturer: MAX; Manufacturer Part Number: MX635-6.35-02P-GN01-Cu-PS-A; Package: Plugin,P=6.35mm; LCSC Part Number: C5188489; Item Type: Screw terminal; ComponentLink1Description: LCSC; ComponentLink1URL: https://www.lcsc.com/product-detail/span-style-background-color-ff0-Screw-span-span-style-background-color-ff0-terminal-span_MAX-MX635-6-35-02P-GN01-Cu-PS-A_C5188489.html
footprint MX635-6.35-02P-GN01-Cu-PS-A
pins: 1, 2

## MX635-6.35-03P-GN01-Cu-PS-A
designator J?
Copper Alloy 1x3P Tin 6.35mm 4 1 3 -40℃~+105℃ 30A 300V Green 10~26 Straight Plugin,P=6.35mm Screw terminal ROHS; Manufacturer: MAX; Manufacturer Part Number: MX635-6.35-03P-GN01-Cu-PS-A; Package: Plugin,P=6.35mm; LCSC Part Number: C5188490; Item Type: Screw terminal; ComponentLink1Description: LCSC; ComponentLink1URL: https://www.lcsc.com/product-detail/span-style-background-color-ff0-Screw-span-span-style-background-color-ff0-terminal-span_MAX-MX635-6-35-03P-GN01-Cu-PS-A_C5188490.html
footprint MX635-6.35-03P-GN01-Cu-PS-A
pins: 1, 2, 3

## MX7620-7.62-02P-GN01-Cu-S-A
designator J?
Connector; Circular; Plug; 5 Position; Shield; Right Angle; Panel Mount; Manufacturer Part no: MX7620-7.62-02P-GN01-Cu-S-A; Manufacturer: TE Connectivity AMP; Manufacturer Part Number: T4144035051-000; Manfacturer: Max; Item Type: Terminal Block; LCSC Part no: C5188497; ComponentLink1Description: LCSC; ComponentLink1URL: https://www.lcsc.com/product-detail/Barrier-Terminal-Blocks_MAX-MX7620-7-62-02P-GN01-Cu-S-A_C5188497.html; Supplier: Avnet; Supplier Part Number: 54AH7380; RoHS: No; Category: Circular Connectors; Stock: 120; Pricing: 1=25.2, 5=23.64, 10=22.07, 25=21.12, 50=20.44 (USD)
footprint MX7620-7.62-02P-GN01-Cu-S-A
pins: 1, 2

## MX8500-8.5-04P-BK01-Cu-S-A
designator J?
Tin 4 1 8.5mm -40℃~+105℃ 20A 300V Black 12~22 Straight pin Copper Alloy 2.5 Plugin,P=8.5mm Barrier Terminal Blocks ROHS; Manufacturer: MAX; Manufacturer Part Number: MX8500-8.5-04P-BK01-Cu-S-A; Package: Plugin,P=8.5mm; LCSC Part Number: C5188508; Item Type: Terminal Block; ComponentLink1Description: LCSC; ComponentLink1URL: https://www.lcsc.com/product-detail/Barrier-Terminal-Blocks_MAX-MX8500-8-5-04P-BK01-Cu-S-A_C5188508.html
footprint MX8500-8.5-04P-BK01-Cu-S-A
pins: 1, 2, 3, 4

## MXHB9500-9.5-02P-BK01-Cu-S-A
designator J?
Tin 1x2P Corner pin Three sides 2 1 9.5mm -40℃~+105℃ 20A 300V Black 10~22 Copper Alloy 0.5~4 Plugin,P=9.5mm Barrier Terminal Blocks ROHS; Manufacturer: MAX; Manufacturer Part Number: MXHB9500-9.5-02P-BK01-Cu-S-A; Package: Plugin,P=9.5mm; LCSC Part Number: C7542168; Item Type: Terminal Block; ComponentLink1Description: LCSC; ComponentLink1URL: https://www.lcsc.com/product-detail/Barrier-Terminal-Blocks_MAX-MXHB9500-9-5-02P-BK01-Cu-S-A_C7542168.html
footprint MXHB9500-9.5-02P-BK01-Cu-S-A
pins: 1, 2

## MXHB9500-9.5-04P-BK01-Cu-S-A
designator J?
Tin 1x4P Corner pin Three sides 4 1 9.5mm -40℃~+105℃ 20A 300V Black 10~22 Copper Alloy 0.5~4 Plugin,P=9.5mm Barrier Terminal Blocks ROHS; Manufacturer: MAX; Manufacturer Part Number: MXHB9500-9.5-04P-BK01-Cu-S-A; Package: Plugin,P=9.5mm; LCSC Part Number: C7542170; Item Type: Terminal Block; ComponentLink1Description: LCSC; ComponentLink1URL: https://www.lcsc.com/product-detail/Barrier-Terminal-Blocks_MAX-MXHB9500-9-5-04P-BK01-Cu-S-A_C7542170.html
footprint MXHB9500-9.5-04P-BK01-Cu-S-A
pins: 1, 2, 3, 4

## MXHB9500-9.5-05P-BK01-Cu-S-A
designator J?
Tin 1x5P Corner pin Three sides 5 1 9.5mm -40℃~+105℃ 20A 300V Black 10~22 Copper Alloy 0.5~4 Plugin,P=9.5mm Barrier Terminal Blocks ROHS; Manufacturer: MAX; Manufacturer Part Number: MXHB9500-9.5-05P-BK01-Cu-S-A; Package: Plugin,P=9.5mm; LCSC Part Number: C7542171; Item Type: Terminal Block; ComponentLink1Description: LCSC; ComponentLink1URL: https://www.lcsc.com/product-detail/Barrier-Terminal-Blocks_MAX-MXHB9500-9-5-05P-BK01-Cu-S-A_C7542171.html
footprint MXHB9500-9.5-05P-BK01-Cu-S-A
pins: 1, 2, 3, 4, 5

## PH-2A
designator J?
1x2P 2P 1 2mm 2 -25℃~+85℃ 5A Straight Plugin,P=2mm Wire To Board / Wire To Wire Connector ROHS; Manufacturer: CAX; Manufacturer Part Number: PH-2A; Package: Plugin,P=2mm; LCSC Part Number: C722767; Item Type: Wire To Board / Wire To Wire Connector; ComponentLink1Description: LCSC; ComponentLink1URL: https://www.lcsc.com/product-detail/Wire-To-Board-Wire-To-Wire-Connector_CAX-PH-2A_C722767.html
footprint PH-2A
pins: 1, 2

## PH-2AW
designator J?
1x2P 2P PH 1 Tin 2mm 2 -25℃~+85℃ Brass 2A Bend insert Push-Pull,P=2mm Wire To Board Connector ROHS; Manufacturer: HCTL; Manufacturer Part Number: PH-2AW; Package: Push-Pull,P=2mm; LCSC Part Number: C2908634; Item Type: Wire To Board Connector; ComponentLink1Description: LCSC; ComponentLink1URL: https://www.lcsc.com/product-detail/Wire-To-Board-Connector_HCTL-PH-2AW_C2908634.html
footprint PH-2AW
pins: 1, 2

## S2B-PH-K-S(LF)(SN)
designator J?
Conn Shrouded Header (4 Sides) HDR 2 POS 2mm Solder RA Side Entry Thru-Hole Box; Manufacturer: JST; Manufacturer Part Number: S2B-PH-K-S(LF)(SN); Contact Resistance: 20mR; Max Current Rating: 2A; Voltage Rating: 100V; Number of Positions: 2; Gender: Male; Insulation Resistance: 1GR; Item Type: JST Connector; Supplier 1: Rs; RoHS: Yes; Category: Headers and Wire Housings; Stock 1: 39975; Pricing 1: 125=0.02920, 250=0.13800, 1250=0.12800, 5000=0.12200 (GBP); Mounting Technology: Through Hole; Pins: 2; Contact Material: Brass,Tin,Bronze; Contact Plating: Tin,Copper; Housing Color: White; Housing Material: Polyamide; Color: Natural,White; Min Operating Temperature: -25°C; Max Operating Temperature: 85°C; Number of Rows: 1; Current Rating: 2A; Packaging: Bulk; Termination: Solder; Fastening Type: Detent; Number of Contacts: 2; Max Voltage Rating (AC): 100V; Orientation: Right Angle; Series: PH; Contact Type: Male Pin; Number of Poles: 2; Voltage Rating (AC): 100V; Max Voltage Rating (DC): 100V; Working Voltage: 100V; Length: 5.9mm; Width: 4.5mm; Height: 9.4mm; Pitch: 2mm; Depth: 7.6mm; Lead Pitch: 2mm; Contact Mating Length: 0.13inch; Reach SVHC Compliant: No; Lead Free: Lead Free; Flammability Rating: UL94 V-0; ComponentLink1URL: https://datasheet.ciiva.com/11747/0900766b8082f558-11747128.pdf?src-supplier=Rs; ComponentLink1Description: https://datasheet.ciiva.com/11747/0900766b8082f558-11747128.pdf?src-supplier=Rs; ComponentLink2URL: https://datasheet.ciiva.com/712/eph-712447.pdf?src-supplier=Digi-Key; ComponentLink2Description: https://datasheet.ciiva.com/712/eph-712447.pdf?src-supplier=Digi-Key; ComponentLink3URL: https://datasheet.ciiva.com/16484/s2b-ph-k-slfsn-16484405.pdf?src-supplier=Future+Electronics; ComponentLink3Description: https://datasheet.ciiva.com/16484/s2b-ph-k-slfsn-16484405.pdf?src-supplier=Future+Electronics; ComponentLink4URL: https://datasheet.ciiva.com/26894/getdatasheetpartid-641020-26894599.pdf?src-supplier=Verical; ComponentLink4Description: https://datasheet.ciiva.com/26894/getdatasheetpartid-641020-26894599.pdf?src-supplier=Verical; ComponentLink5URL: https://datasheet.ciiva.com/8052/80564-8052207.pdf?src-supplier=Element14; ComponentLink5Description: https://datasheet.ciiva.com/8052/80564-8052207.pdf?src-supplier=Element14; Supplier Part Number 1: 8201494P; LCSC Part Number: C173752
footprint S2B-PH-K-S(LF)(SN)
pins: 1, 2